# EAGLE library part 6130XX11821_61300611821 (library WR-PHD)
WR-PHD 2.54 mm Socket Header Article Properties Pins (Value) 2 pcs; 3 pcs; 4 pcs; 5 pcs; 6 pcs; 7 pcs; 8 pcs; 9 pcs; 10 pcs; 12 pcs; 13 pcs; 14 pcs; 15 pcs; 16 pcs; 18 pcs; 20 pcs; 22 pcs; 24 pcs; 32 pcs; 36 pcs; 40 pcs General Information Operating Temperature -40 °C up to +105 °C Pitch 2.54 mm Durability 30 Mating cycles; 500 Mating cycles Rows Single Gender Socket Header Type Straight Material Properties Insulator Material PBT Insulator Flammability Rating UL94 V-0 Contact Material Copper Alloy Contact Plating Gold Contact Type Stamped Certification UL Approval E323964 Packaging Properties Packaging Tray Electrical Properties Withstanding Voltage 500 V (AC) Contact Resistance 20 mΩ RISO 1000 MΩ <https://www.we-online.com/components/media/o33218v209%20Family-WR-PHD-6130xx11821.jpg> Details see: www.we-online.com/en/components/products/PHD_2_54_SOCKET_HEADER_6130XX11821 <www.we-online.com/catalog/PHD_2_54_SOCKET_HEADER_6130XX11821/?utm_source=eagle_model&utm_medium=description_link&utm_campaign=eisos_eagle> Updated by Ella 2024-09-11 2024 (C) Würth Elektronik
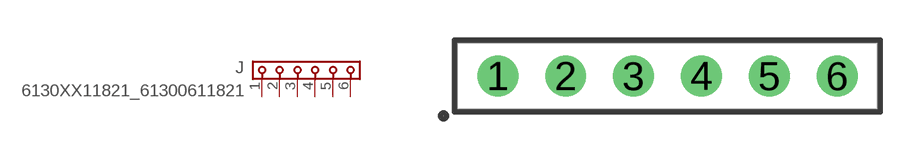
[diagram p216: symbol with the pads of 61300611821; footprint 61300611821]

Designator prefix J

## 6130XX11821_61300611821 (DATASHEET-URL: https://www.we-online.com/redexpert/spec/61300611821?ae; GENDER: Socket Header; IR: 3A; MOUNT: THT; PACKAGING: Tray; PART-NUMBER: 61300611821; PINS: 6; PITCH: 2.54 mm; ROWS: Single; TYPE: Straight; VALUE: 61300611821)  [61300611821]
1  1  pas
2  2  pas
3  3  pas
4  4  pas
5  5  pas
6  6  pas

## Footprint 61300611821 (pad centres in mm)
WR-PHD 2.54 mm Socket Header, 6 Pins
drill 1.02: 1 -6.35,0; 2 -3.81,0; 3 -1.27,0; 4 1.27,0; 5 3.81,0; 6 6.35,0